# Altium schematic symbol library Schlib1.SchLib: 13 symbols
Pins are listed as number, name and electrical type; pins without a type are passive.

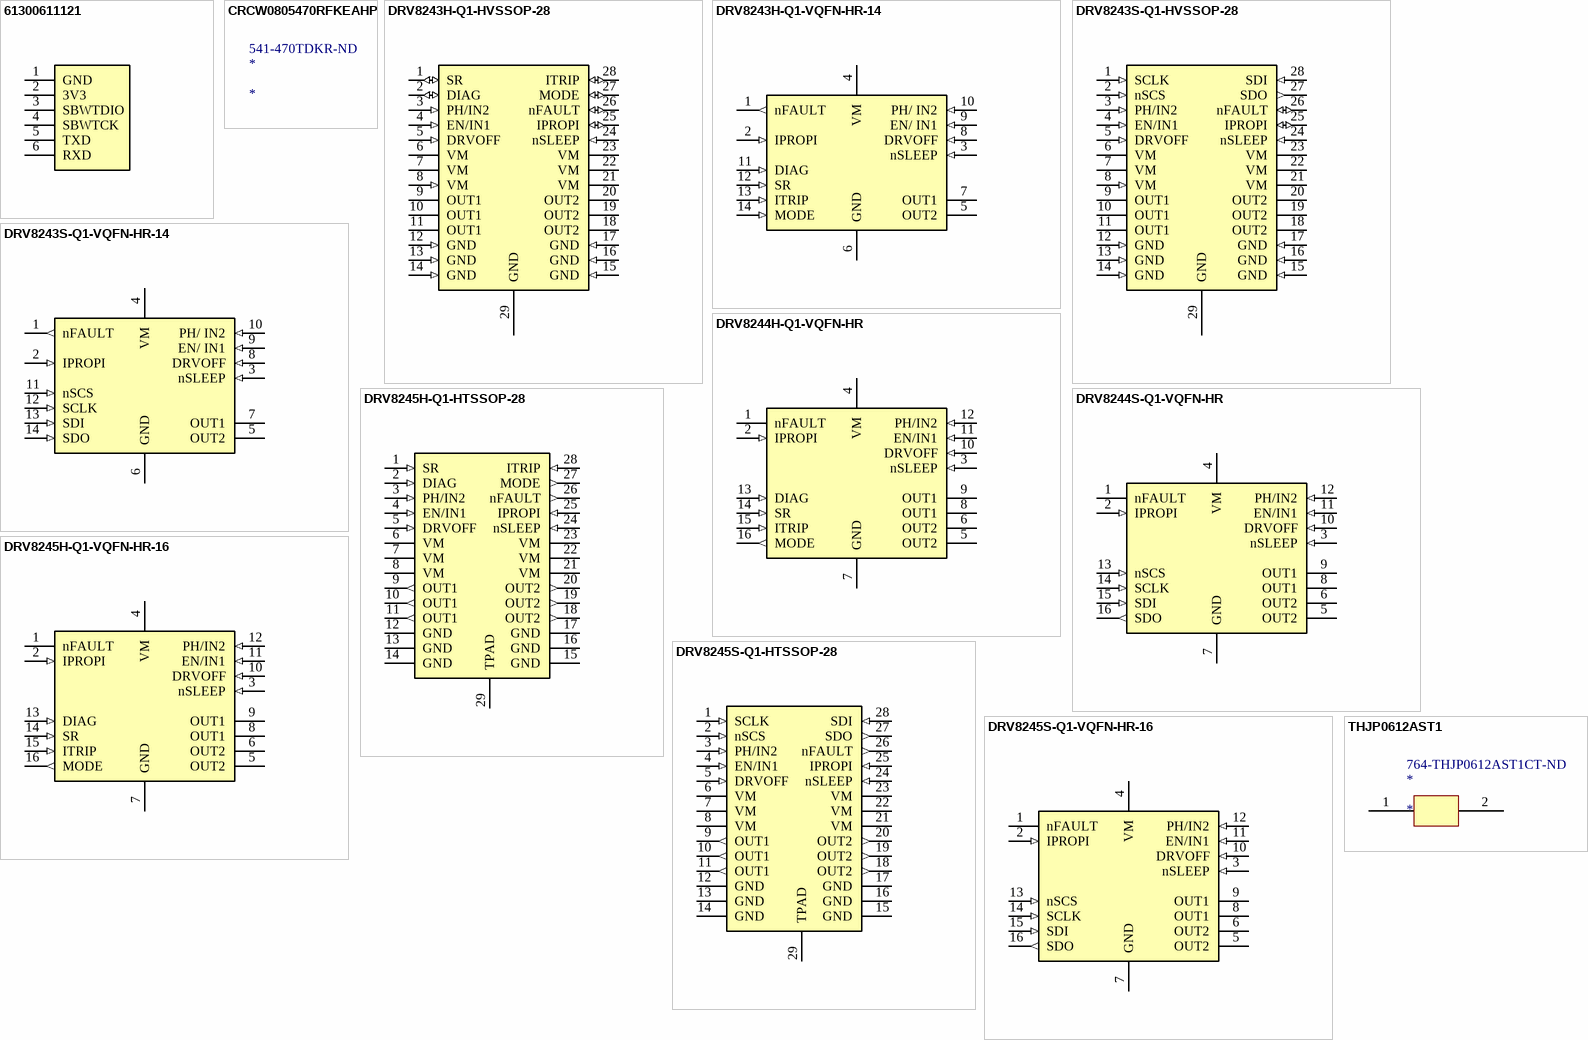
[diagram p0: symbols 61300611121 to THJP0612AST1]

## 61300611121
designator U?, comment Used in BOM report
WURTH ELEKTRONIK - 61300611121 - Pin Header, Board-to-Board, 2.54 mm, 1 Rows, 6 Contacts, Through Hole, WR-PHD Series; CompType: Used in some BOM reports.  Useful for finding later.; Current Rating: 3A; Voltage Rating: 250V; Number of Positions: 6; Gender: Male; Connector Type: Male Pin; Pitch: 0.1inch; Manufacturer: Used in BOM report; MountType: SMT, TH, or N/A; RoHS: Used in BOM report.  Use Y or N.; PartNumber: Used in BOM report; PackageReference: eg:  0603, used in PnP report; ComponentLink1Description: Datasheet Link; Alternate PartNumber: -; Alternate Manufacturer: -; Supplier 1: Digi-Key; Supplier Part Number 1: 732-5319-ND; Manufacturer Part Number: 61300611121; Stock 1: 28036; Pricing 1: 1=0.33, 10=0.279, 25=0.232, 50=0.194, 100=0.176, 1000=0.16 (USD); Mount: Through Hole; Contact Plating: Gold; Contact Material: Copper Alloy,Copper; Housing Material: PBT; Color: Black; Min Operating Temperature: -40°C; Max Operating Temperature: 125°C; Number of Rows: 1; Contact Gender: Male; Packaging: Bulk; Termination: Through Hole; Number of Contacts: 6; Contact Mating Length: 0.236inch; REACH SVHC: Unknown; Lead Free: Lead Free; ComponentLink2URL: http://www.farnell.com/cad/1737268.pdf?src-supplier=Element14; ComponentLink2Description: http://www.farnell.com/cad/1737268.pdf?src-supplier=Element14; ComponentLink3URL: https://katalog.we-online.de/em/datasheet/6130xx11121.pdf?src-supplier=Digi-Key; ComponentLink3Description: https://katalog.we-online.de/em/datasheet/6130xx11121.pdf?src-supplier=Digi-Key; ComponentLink4URL: http://www.mouser.com/ds/2/445/6130xx11121-538006.pdf?src-supplier=Mouser; ComponentLink4Description: http://www.mouser.com/ds/2/445/6130xx11121-538006.pdf?src-supplier=Mouser
pins: 1 GND (power) "3V3", 2 3V3, 3 SBWTDIO, 4 SBWTCK, 5 TXD, 6 RXD

## CRCW0805470RFKEAHP
designator *  Supplier Part Number 1: 541-470TDKR-ND
Surface Mount Chip Resistor, Thick Film, AEC-Q200 CRCW Series, 470 ohm, 330 mW, 1%, 150 V ;RoHS Compliant: Yes; Manufacturer: Vishay; Manufacturer Part Number: CRCW0805470RFKEAHP; Resistance: 470R; Power Rating: 330mW; Voltage Rating: 150V; Max Power Dissipation: 333mW; Temperature Coefficient: 100ppm/°C; Supplier 1: Digi-Key; Stock 1: 22002; Pricing 1: 1=0.23, 10=0.193, 100=0.0753, 1000=0.0315, 2500=0.02888 (USD); Case/Package: 0805; Weight: 0.000194oz; Case Code (Metric): 2012; Case Code (Imperial): 0805; Contact Plating: Tin; Min Operating Temperature: -55°C; Max Operating Temperature: 155°C; Packaging: Tape and Reel; Tolerance: 1%; Package Quantity: 10; Resistor Type: Thick Film; Number of Terminations: 2; Termination: SMD/SMT; Voltage Rating (DC): 150V; Features: Automotive AEC-Q200; Series: CRCW-HP; Construction: Rectangular; Resistance Tolerance: 1%; Technology: THICK FILM; Length: 2mm; Width: 0.049inch; Height: 0.024inch; Depth: 1.25mm; Radiation Hardening: No; REACH SVHC: Unknown; Military Standard: Not; Lead Free: Lead Free; ComponentLink1URL: http://www.vishay.com/docs/20043/crcwhpe3.pdf?src-supplier=Digi-Key; ComponentLink1Description: http://www.vishay.com/docs/20043/crcwhpe3.pdf?src-supplier=Digi-Key; ComponentLink2URL: http://www.mouser.com/ds/2/427/crcwhpe3-46056.pdf?src-supplier=Mouser; ComponentLink2Description: http://www.mouser.com/ds/2/427/crcwhpe3-46056.pdf?src-supplier=Mouser; ComponentLink3URL: http://www.farnell.com/datasheets/2140397.pdf?src-supplier=Element14; ComponentLink3Description: http://www.farnell.com/datasheets/2140397.pdf?src-supplier=Element14
footprint 0805

## DRV8243H-Q1-HVSSOP-28
designator U?, comment DRV8243H-Q1
Manufacturer: Texas Instruments; CompType: Used in some BOM reports.  Useful for finding later.; MountType: SMT; RoHS: Y; PartNumber: DRV8243H-Q1; PackageReference: HVSSOP-28; ComponentLink1Description: Datasheet Link; Alternate PartNumber: -; Alternate Manufacturer: -
footprint HVSSOP-28
pins: 1 SR (io), 2 DIAG (io), 3 PH/IN2 (in), 4 EN/IN1 (in), 5 DRVOFF (in), 6 VM (power), 7 VM (power), 8 VM (in), 9 OUT1 (power), 10 OUT1 (power), 11 OUT1 (power), 12 GND (in), 13 GND (in), 14 GND (in), 15 GND (in), 16 GND (in), 17 GND (in), 18 OUT2 (power), 19 OUT2 (power), 20 OUT2 (power), 21 VM (power), 22 VM (power), 23 VM (power), 24 nSLEEP (in), 25 IPROPI (io), 26 nFAULT (io), 27 MODE (io), 28 ITRIP (io), 29 GND (power) "Thermal Pad"

## DRV8243H-Q1-VQFN-HR-14
designator U?, comment DRV8243H-Q1
Manufacturer: Texas Instruments; CompType: Used in some BOM reports.  Useful for finding later.; MountType: SMT; RoHS: Y; PartNumber: DRV8243H-Q1; PackageReference: VQFN-14; ComponentLink1Description: Datasheet Link; Alternate PartNumber: -; Alternate Manufacturer: -
footprint VQFN-HR (14)
pins: 1 nFAULT (out), 2 IPROPI (in), 3 nSLEEP (in), 4 VM (power), 5 OUT2 (power), 6 GND (power), 7 OUT1 (power), 8 DRVOFF (in), 9 EN/ IN1 (in), 10 PH/ IN2 (in), 11 DIAG (in), 12 SR (in), 13 ITRIP (in), 14 MODE (in)

## DRV8243S-Q1-HVSSOP-28
designator U?, comment Used in BOM report
DRV8243S-Q1 HVSSOP-28; CompType: Used in some BOM reports.  Useful for finding later.; Manufacturer: Used in BOM report; MountType: SMT, TH, or N/A; RoHS: Used in BOM report.  Use Y or N.; PartNumber: Used in BOM report; PackageReference: eg:  0603, used in PnP report; ComponentLink1Description: Datasheet Link; Alternate PartNumber: -; Alternate Manufacturer: -
footprint HTSSOP28
footprint HVSSOP-28
pins: 1 SCLK (in), 2 nSCS (in), 3 PH/IN2 (in), 4 EN/IN1 (in), 5 DRVOFF (in), 6 VM (power), 7 VM (power), 8 VM (in), 9 OUT1 (power), 10 OUT1 (power), 11 OUT1 (power), 12 GND (in), 13 GND (in), 14 GND (in), 15 GND (in), 16 GND (in), 17 GND (in), 18 OUT2 (power), 19 OUT2 (power), 20 OUT2 (power), 21 VM (power), 22 VM (power), 23 VM (power), 24 nSLEEP (in), 25 IPROPI (io), 26 nFAULT (io), 27 SDO (out), 28 SDI (in), 29 GND (power) "thermal-pad"

## DRV8243S-Q1-VQFN-HR-14
designator U?, comment DRV8243S-Q1
Manufacturer: Texas Instruments; CompType: Used in some BOM reports.  Useful for finding later.; MountType: SMT; RoHS: Y; PartNumber: DRV8243S-Q1; PackageReference: VQFN-14; ComponentLink1Description: Datasheet Link; Alternate PartNumber: -; Alternate Manufacturer: -
footprint VQFN-HR (14)
pins: 1 nFAULT (out), 2 IPROPI (in), 3 nSLEEP (in), 4 VM (power), 5 OUT2 (power), 6 GND (power), 7 OUT1 (power), 8 DRVOFF (in), 9 EN/ IN1 (in), 10 PH/ IN2 (in), 11 nSCS (in), 12 SCLK (in), 13 SDI (in), 14 SDO (in)

## DRV8244H-Q1-VQFN-HR
designator U?, comment DRV8244H-Q1
Manufacturer: Texas Instruments; CompType: Used in some BOM reports.  Useful for finding later.; MountType: SMT; RoHS: Y; PartNumber: DRV8244H-Q1; PackageReference: VQFN; ComponentLink1Description: Datasheet Link; Alternate PartNumber: -; Alternate Manufacturer: -
footprint VQFN-HR (DRV8x44)
pins: 1 nFAULT (oc), 2 IPROPI (in), 3 nSLEEP (in), 4 VM (power), 5 OUT2 (power), 6 OUT2 (power), 7 GND (power), 8 OUT1 (power), 9 OUT1 (power), 10 DRVOFF (in), 11 EN/IN1 (in), 12 PH/IN2 (in), 13 DIAG (in), 14 SR (in), 15 ITRIP (in), 16 MODE (out)

## DRV8244S-Q1-VQFN-HR
designator U?, comment DRV8244S-Q1
Manufacturer: Texas Instruments; CompType: Used in some BOM reports.  Useful for finding later.; MountType: SMT; RoHS: Y; PartNumber: DRV8244S-Q1; PackageReference: VQFN; ComponentLink1Description: Datasheet Link; Alternate PartNumber: -; Alternate Manufacturer: -
footprint VQFN-HR (DRV8x44)
pins: 1 nFAULT (oc), 2 IPROPI (in), 3 nSLEEP (in), 4 VM (power), 5 OUT2 (power), 6 OUT2 (power), 7 GND (power), 8 OUT1 (power), 9 OUT1 (power), 10 DRVOFF (in), 11 EN/IN1 (in), 12 PH/IN2 (in), 13 nSCS (in), 14 SCLK (in), 15 SDI (in), 16 SDO (out)

## DRV8245H-Q1-HTSSOP-28
designator U?, comment DRV8245SH-Q1
DRV8245H-Q1 HTSSOP 28-pin leaded package; Manufacturer: Used in BOM report; CompType: Used in some BOM reports.  Useful for finding later.; MountType: SMT, TH, or N/A; RoHS: Used in BOM report.  Use Y or N.; PartNumber: DRV8245SH-Q1; PackageReference: eg:  0603, used in PnP report; ComponentLink1Description: Datasheet Link; Alternate PartNumber: -; Alternate Manufacturer: -
footprint HTSSOP-28-epod
pins: 1 SR (in), 2 DIAG (in), 3 PH/IN2 (in), 4 EN/IN1 (in), 5 DRVOFF (in), 6 VM (power), 7 VM (power), 8 VM (power), 9 OUT1 (out), 10 OUT1 (out), 11 OUT1 (out), 12 GND, 13 GND, 14 GND, 15 GND, 16 GND, 17 GND, 18 OUT2 (out), 19 OUT2 (out), 20 OUT2 (out), 21 VM (power), 22 VM (power), 23 VM (power), 24 nSLEEP (in), 25 IPROPI (in), 26 nFAULT (out), 27 MODE (out), 28 ITRIP (in), 29 TPAD

## DRV8245H-Q1-VQFN-HR-16
designator U?, comment DRV8245H-Q1
Manufacturer: Texas Instruments; CompType: Used in some BOM reports.  Useful for finding later.; MountType: SMT; RoHS: Y; PartNumber: DRV8245H-Q1; PackageReference: VQFN-16; ComponentLink1Description: Datasheet Link; Alternate PartNumber: -; Alternate Manufacturer: -
footprint VQFN-HR (16)
pins: 1 nFAULT (oc), 2 IPROPI (in), 3 nSLEEP (in), 4 VM (power), 5 OUT2 (power), 6 OUT2 (power), 7 GND (power), 8 OUT1 (power), 9 OUT1 (power), 10 DRVOFF (in), 11 EN/IN1 (in), 12 PH/IN2 (in), 13 DIAG (in), 14 SR (in), 15 ITRIP (in), 16 MODE (out)

## DRV8245S-Q1-HTSSOP-28
designator U?, comment DRV8245SH-Q1
DRV8245S-Q1 HTSSOP 28-pin leaded package; Manufacturer: Used in BOM report; CompType: Used in some BOM reports.  Useful for finding later.; MountType: SMT, TH, or N/A; RoHS: Used in BOM report.  Use Y or N.; PartNumber: DRV8245SH-Q1; PackageReference: eg:  0603, used in PnP report; ComponentLink1Description: Datasheet Link; Alternate PartNumber: -; Alternate Manufacturer: -
footprint HTSSOP-28-epod
pins: 1 SCLK (in), 2 nSCS    (in), 3 PH/IN2 (in), 4 EN/IN1 (in), 5 DRVOFF (in), 6 VM (power), 7 VM (power), 8 VM (power), 9 OUT1 (out), 10 OUT1 (out), 11 OUT1 (out), 12 GND, 13 GND, 14 GND, 15 GND, 16 GND, 17 GND, 18 OUT2 (out), 19 OUT2 (out), 20 OUT2 (out), 21 VM (power), 22 VM (power), 23 VM (power), 24 nSLEEP (in), 25 IPROPI (in), 26 nFAULT (out), 27 SDO (out), 28 SDI (in), 29 TPAD

## DRV8245S-Q1-VQFN-HR-16
designator U?, comment DRV8245S-Q1
Manufacturer: Texas Instruments; CompType: Used in some BOM reports.  Useful for finding later.; MountType: SMT; RoHS: Y; PartNumber: DRV8245S-Q1; PackageReference: VQFN-16; ComponentLink1Description: Datasheet Link; Alternate PartNumber: -; Alternate Manufacturer: -
footprint VQFN-HR (16)
pins: 1 nFAULT (oc), 2 IPROPI (in), 3 nSLEEP (in), 4 VM (power), 5 OUT2 (power), 6 OUT2 (power), 7 GND (power), 8 OUT1 (power), 9 OUT1 (power), 10 DRVOFF (in), 11 EN/IN1 (in), 12 PH/IN2 (in), 13 nSCS (in), 14 SCLK (in), 15 SDI (in), 16 SDO (out)

## THJP0612AST1
designator *  Supplier Part Number 1: 764-THJP0612AST1CT-ND
Thermal Jumper; Manufacturer: Vishay; Manufacturer Part Number: THJP0612AST1; Supplier 1: Digi-Key; Stock 1: 1297; Pricing 1: 1=0.77, 10=0.743, 25=0.72, 50=0.675, 100=0.6075, 250=0.59852, 500=0.5625 (USD); ComponentLink1Description: Thermal Jumper; ComponentLink1URL: https://www.digikey.com/en/products/detail/vishay-thin-film/THJP0612AST1/11313314
footprint 0612
pins: 1, 2